# Altium footprint library 加热模块V2.4.PcbLib: 33 footprints (part 2 of 3)
Each footprint in its own frame and in the unit in brackets; x right, y up, seen from the top. Pads: shape width x height; smd on the part's side, far side on the other; paste and mask are expansions set on the pad; w line width, h text height; cw(c..) or ccw(c..) is an arc to the next point about the centre after c.
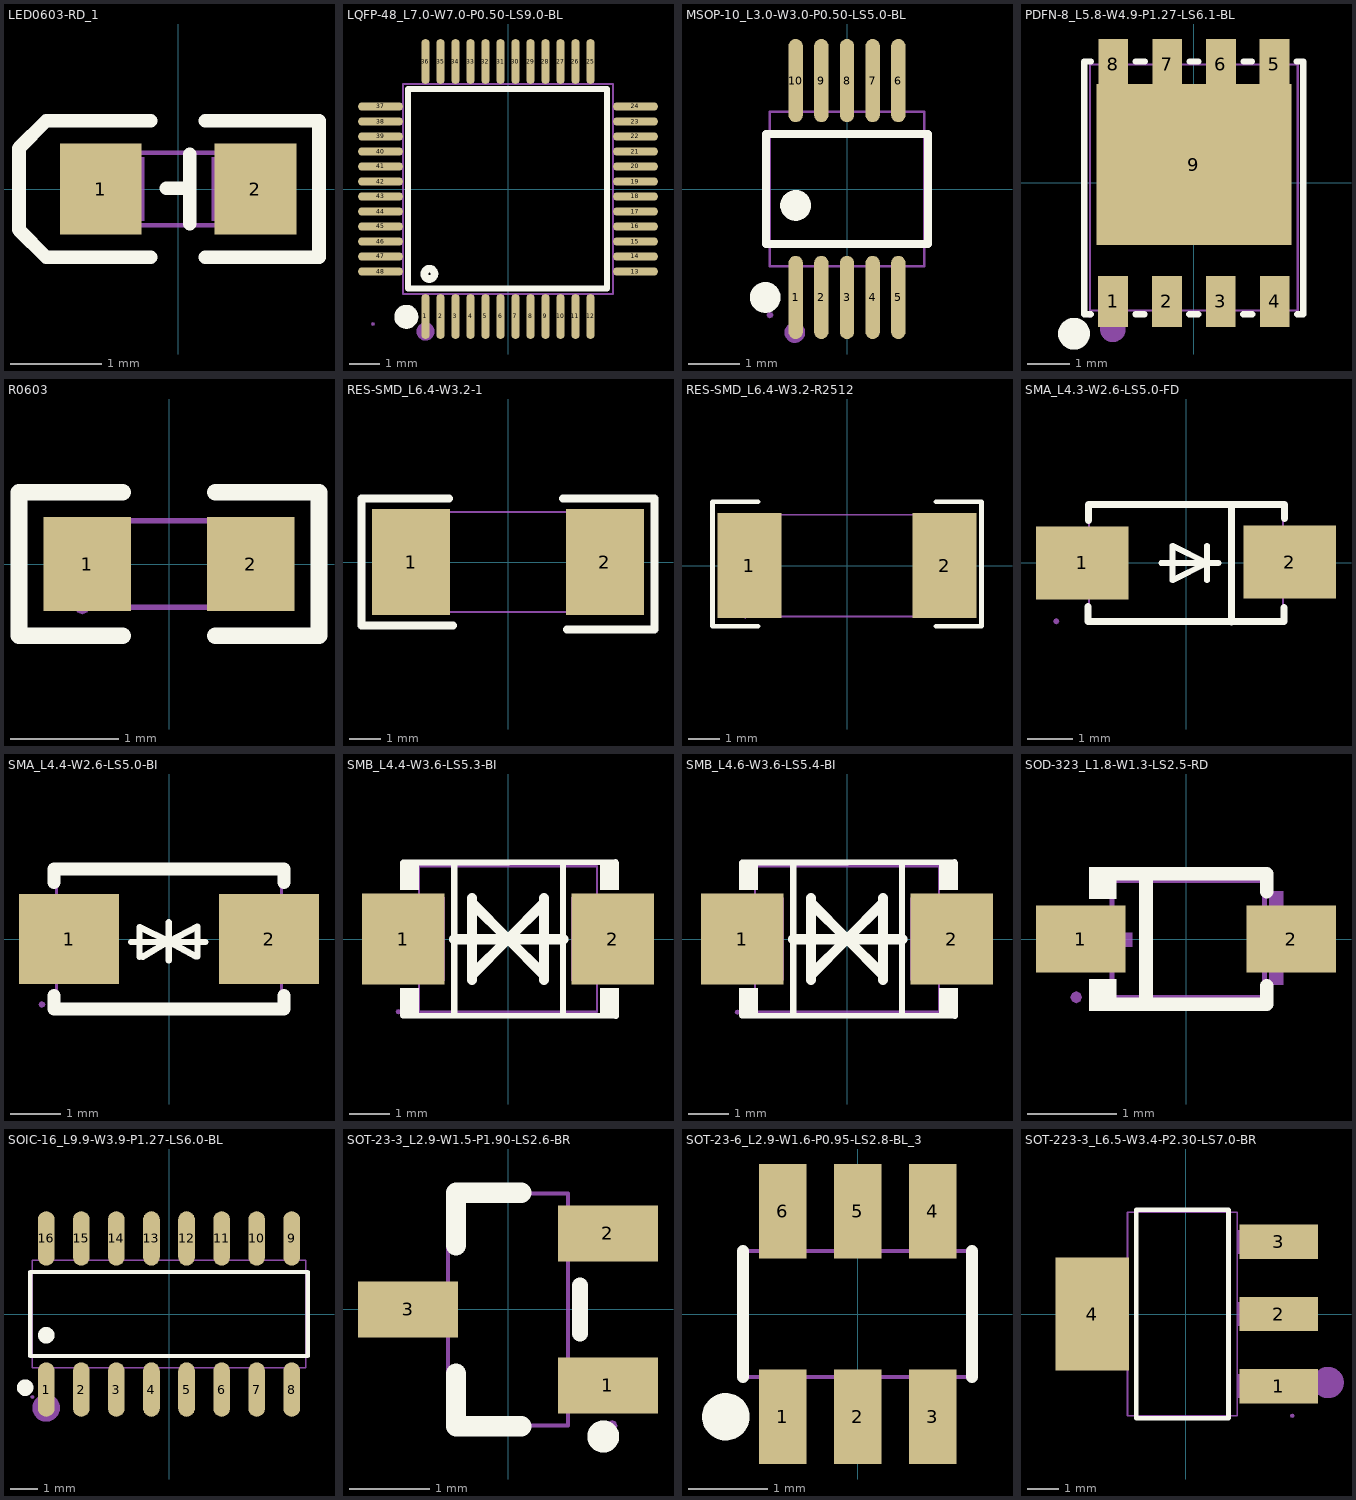
[diagram p1: the footprints below, top view; thin cyan lines are the x and y axes]

## LED0603-RD_1 [mm]
pads (2):
  rect 0.9x1 smd: 1(-0.85,0) 2(0.85,0)
Top Overlay:
  lines w0.15: -0.3,-0.75 -1.45,-0.75 -1.75,-0.45 -1.75,-0.35 -1.75,0.35 -1.75,0.45 -1.45,0.75 -0.3,0.75 ; -0.127,0.007 0.127,0.007 ; 0.127,-0.381 0.127,0.381 ; 0.3,-0.75 1.55,-0.75 ; 0.3,0.75 1.55,0.75 1.55,-0.73
Mechanical 6:
  region: 1.1,-0.1 0.5,-0.1 0.5,0.05 1.1,0.05
  region: -0.6,-0.1 -1.2,-0.1 -1.2,0.05 -0.6,0.05
  region: 0.865,0.273 0.865,-0.327 0.715,-0.327 0.715,0.273
Mechanical 15:
  region: 0.8,0.35 0.8,-0.35 0.37,-0.35 0.37,0.35
  region: -0.37,0.35 -0.37,-0.35 -0.8,-0.35 -0.8,0.35
  region: 0.8,0.465 0.754,0.446 0.735,0.4 0.754,0.354 0.8,0.335 0.846,0.354 0.865,0.4 0.846,0.446
  lines w0.051: -0.8,-0.4 -0.8,0.4 0.8,0.4 0.8,-0.4 -0.8,-0.4

## LQFP-48_L7.0-W7.0-P0.50-LS9.0-BL [mm]
pads (48):
  oval 0.27x1.5 smd paste+0 mask+0.05: 1(-2.75,-4.25) 2(-2.25,-4.25) 3(-1.75,-4.25) 4(-1.25,-4.25) 5(-0.75,-4.25) 6(-0.25,-4.25) 7(0.25,-4.25) 8(0.75,-4.25) 9(1.25,-4.25) 10(1.75,-4.25) 11(2.25,-4.25) 12(2.75,-4.25) 25(2.75,4.25) 26(2.25,4.25) 27(1.75,4.25) 28(1.25,4.25) 29(0.75,4.25) 30(0.25,4.25) 31(-0.25,4.25) 32(-0.75,4.25) 33(-1.25,4.25) 34(-1.75,4.25) 35(-2.25,4.25) 36(-2.75,4.25)
  oval 1.5x0.27 smd paste+0 mask+0.05: 13(4.25,-2.75) 14(4.25,-2.25) 15(4.25,-1.75) 16(4.25,-1.25) 17(4.25,-0.75) 18(4.25,-0.25) 19(4.25,0.25) 20(4.25,0.75) 21(4.25,1.25) 22(4.25,1.75) 23(4.25,2.25) 24(4.25,2.75) 37(-4.25,2.75) 38(-4.25,2.25) 39(-4.25,1.75) 40(-4.25,1.25) 41(-4.25,0.75) 42(-4.25,0.25) 43(-4.25,-0.25) 44(-4.25,-0.75) 45(-4.25,-1.25) 46(-4.25,-1.75) 47(-4.25,-2.25) 48(-4.25,-2.75)
Top Overlay:
  circle w0.254: c-2.62,-2.83 r0.17
  lines w0.2: -2.896,3.34 3.302,3.34 3.302,-3.315 -3.327,-3.315 -3.327,3.34 -2.565,3.34
  lines w0.4: -3.39,-4.06 ccw(c-3.389,-4.26) -3.387,-4.06
Mechanical 6:
  circle w0.3: c-2.75,-4.75 r0.15
Mechanical 15:
  drawing of 101 lines, arcs and shapes, not listed

## MSOP-10_L3.0-W3.0-P0.50-LS5.0-BL [mm]
pads (10):
  oval 0.28x1.62 smd: 1(-1,-2.11) 2(-0.5,-2.11) 3(0,-2.11) 4(0.5,-2.11) 5(1,-2.11) 6(1,2.11) 7(0.5,2.11) 8(0,2.11) 9(-0.5,2.11) 10(-1,2.11)
Top Overlay:
  circle w0.3: c-1,-0.319 r0.15
  circle w0.3: c-1.592,-2.11 r0.15
  lines w0.152: -1.576,-1.071 -1.576,1.071 1.576,1.071 1.576,-1.071 -1.576,-1.071
Mechanical 6:
  circle w0.2: c-1.016,-2.794 r0.1
Mechanical 15:
  region: -1.5,-2.515 -1.454,-2.496 -1.435,-2.45 -1.454,-2.404 -1.5,-2.385 -1.546,-2.404 -1.565,-2.45 -1.546,-2.496
  region: -1.112,-2.45 -1.112,-1.9 -0.888,-1.9 -0.888,-2.45
  region: -1.112,-1.91 -1.112,-1.49 -0.888,-1.49 -0.888,-1.91
  region: -0.612,-2.45 -0.612,-1.9 -0.388,-1.9 -0.388,-2.45
  region: -0.612,-1.91 -0.612,-1.49 -0.388,-1.49 -0.388,-1.91
  region: -0.112,-2.45 -0.112,-1.9 0.112,-1.9 0.112,-2.45
  region: -0.112,-1.91 -0.112,-1.49 0.112,-1.49 0.112,-1.91
  region: 0.388,-2.45 0.388,-1.9 0.612,-1.9 0.612,-2.45
  region: 0.388,-1.91 0.388,-1.49 0.612,-1.49 0.612,-1.91
  region: 0.888,-2.45 0.888,-1.9 1.112,-1.9 1.112,-2.45
  region: 0.888,-1.91 0.888,-1.49 1.112,-1.49 1.112,-1.91
  region: -1.112,2.45 -1.112,1.9 -0.888,1.9 -0.888,2.45
  region: -1.112,1.91 -1.112,1.49 -0.888,1.49 -0.888,1.91
  region: -0.612,2.45 -0.612,1.9 -0.388,1.9 -0.388,2.45
  region: -0.612,1.91 -0.612,1.49 -0.388,1.49 -0.388,1.91
  region: -0.112,2.45 -0.112,1.9 0.112,1.9 0.112,2.45
  region: -0.112,1.91 -0.112,1.49 0.112,1.49 0.112,1.91
  region: 0.388,2.45 0.388,1.9 0.612,1.9 0.612,2.45
  region: 0.388,1.91 0.388,1.49 0.612,1.49 0.612,1.91
  region: 0.888,2.45 0.888,1.9 1.112,1.9 1.112,2.45
  region: 0.888,1.91 0.888,1.49 1.112,1.49 1.112,1.91
  lines w0.051: -1.5,-1.5 -1.5,1.5 1.5,1.5 1.5,-1.5 -1.5,-1.5

## PDFN-8_L5.8-W4.9-P1.27-LS6.1-BL [mm]
pads (9):
  rect 0.7x1.2 smd paste-100 mask+0.05: 1(-1.905,-2.792) 2(-0.635,-2.792) 3(0.635,-2.792) 4(1.905,-2.792) 5(1.9,2.792) 6(0.64,2.792) 7(-0.63,2.792) 8(-1.9,2.792)
  rect 4.6x3.8 smd paste-100 mask+0.05: 9(0,0.433)
Top Overlay:
  lines w0.15: -2.58,2.863 -2.58,-3.097 -2.434,-3.097 ; -2.57,2.863 -2.429,2.863 ; -1.376,-3.097 -1.164,-3.097 ; -1.371,2.863 -1.159,2.863 ; -0.106,-3.097 0.106,-3.097 ; -0.101,2.863 0.111,2.863 ; 1.164,-3.097 1.376,-3.097 ; 1.169,2.863 1.371,2.863 ; 2.429,2.863 2.58,2.863 2.58,2.833 2.58,-3.097 2.434,-3.097
  lines w0.5: -2.95,-3.557 ccw(c-2.826,-3.556) -2.95,-3.555
Top Paste:
  region: -2.3,2.332 -2.3,-1.467 2.3,-1.467 2.3,2.332 2.25,2.332 2.25,3.393 1.55,3.393 1.55,2.332 0.99,2.332 0.99,3.392 0.291,3.392 0.291,2.332 -0.28,2.332 -0.28,3.392 -0.979,3.392 -0.979,2.332 -1.551,2.332 -1.551,3.392 -2.25,3.392 -2.25,2.333 -2.251,2.332
  region: 1.555,-2.192 2.255,-2.192 2.255,-3.392 1.555,-3.392
  region: 0.285,-2.192 0.985,-2.192 0.985,-3.392 0.285,-3.392
  region: -0.985,-2.192 -0.285,-2.192 -0.285,-3.392 -0.985,-3.392
  region: -2.255,-2.192 -1.555,-2.192 -1.555,-3.392 -2.255,-3.392
Mechanical 6:
  circle w0.3: c-1.91,-3.452 r0.15
Mechanical 15:
  region: 2.005,-1.183 -2.005,-1.183 -2.005,2.292 2.005,2.292
  region: 1.705,-2.475 2.105,-2.475 2.105,-3.11 1.705,-3.11
  region: 0.435,-2.475 0.835,-2.475 0.835,-3.11 0.435,-3.11
  region: -0.835,-2.475 -0.435,-2.475 -0.435,-3.11 -0.835,-3.11
  region: -2.105,-2.475 -1.705,-2.475 -1.705,-3.11 -2.105,-3.11
  region: -2.1,2.939 -1.7,2.939 -1.7,2.29 -2.1,2.29
  region: -0.83,2.939 -0.43,2.939 -0.43,2.29 -0.83,2.29
  region: 0.44,2.939 0.84,2.939 0.84,2.29 0.44,2.29
  region: 1.7,2.939 2.1,2.939 2.1,2.29 1.7,2.29
  region: -2.45,-3.045 -2.496,-3.064 -2.515,-3.11 -2.496,-3.156 -2.45,-3.175 -2.404,-3.156 -2.385,-3.11 -2.404,-3.064
  lines w0.051: -2.45,-3.007 -2.45,2.793 2.45,2.793 2.45,-3.007 -2.45,-3.007

## R0603 [mm]
pads (2):
  rect 0.806x0.864 smd paste-100 mask+0.051: 1(-0.753,0) 2(0.753,0)
Top Overlay:
  lines w0.152: -0.426,-0.661 -1.385,-0.661 -1.385,0.661 -0.426,0.661 ; 0.426,-0.661 1.385,-0.661 1.385,0.661 0.426,0.661
Top Paste:
  region: -1.195,-0.45 -0.395,-0.45 -0.345,-0.4 -0.345,-0.172 -0.715,-0.172 -0.715,0.158 -0.345,0.158 -0.345,0.4 -0.395,0.45 -1.195,0.45 -1.245,0.4 -1.245,-0.4
  region: 1.195,0.45 0.395,0.45 0.345,0.4 0.345,0.172 0.715,0.172 0.715,-0.158 0.345,-0.158 0.345,-0.4 0.395,-0.45 1.195,-0.45 1.245,-0.4 1.245,0.4
Mechanical 15:
  region: 0.8,-0.4 0.8,0.4 0.5,0.4 0.5,-0.4
  region: -0.8,-0.4 -0.8,0.4 -0.5,0.4 -0.5,-0.4
  region: -0.8,-0.465 -0.846,-0.446 -0.865,-0.4 -0.846,-0.354 -0.8,-0.335 -0.754,-0.354 -0.735,-0.4 -0.754,-0.446
  lines w0.051: -0.8,-0.4 0.8,-0.4 0.8,0.4 -0.8,0.4 -0.8,-0.4

## RES-SMD_L6.4-W3.2-1 [mm]
pads (2):
  rect 2.5x3.4 smd: 1(-3.1,0) 2(3.1,0)
Top Overlay:
  lines w0.254: -1.893,2.032 -4.687,2.032 -4.687,-2.032 -1.766,-2.032 ; 1.766,2.032 4.687,2.032 4.687,-2.159 1.893,-2.159
Mechanical 15:
  region: -3.2,-1.535 -3.246,-1.554 -3.265,-1.6 -3.246,-1.646 -3.2,-1.665 -3.154,-1.646 -3.135,-1.6 -3.154,-1.554
  region: -3.2,1.6 -2.3,1.6 -2.3,-1.6 -3.2,-1.6
  region: 2.3,1.6 3.2,1.6 3.2,-1.6 2.3,-1.6
  lines w0.051: -3.2,-1.6 3.2,-1.6 3.2,1.6 -3.2,1.6 -3.2,-1.6

## RES-SMD_L6.4-W3.2-R2512 [mm]
pads (2):
  rect 2x3.3 smd: 1(-3.066,0) 2(3.066,0)
Top Overlay:
  lines w0.152: -2.794,-1.905 -4.229,-1.905 -4.229,2.008 -2.794,2.008 ; 2.794,-1.905 4.229,-1.905 4.229,2.008 2.794,2.008
Mechanical 15:
  region: 2.299,1.6 3.199,1.6 3.199,-1.6 2.299,-1.6
  region: -3.199,1.6 -2.299,1.6 -2.299,-1.6 -3.199,-1.6
  region: -3.2,-1.535 -3.246,-1.554 -3.265,-1.6 -3.246,-1.646 -3.2,-1.665 -3.154,-1.646 -3.135,-1.6 -3.154,-1.554
  lines w0.051: -3.2,-1.6 3.2,-1.6 3.2,1.6 -3.2,1.6 -3.2,-1.6

## SMA_L4.3-W2.6-LS5.0-FD [mm]
pads (2):
  rect 2.046x1.62 smd: 1(-2.304,-0.009) 2(2.304,0.009)
Top Overlay:
  lines w0.127: -0.551,-0.01 0.719,-0.01 ; 0.465,-0.391 0.465,-0.01 ; 0.465,0.371 0.465,-0.01 ; 0.465,-0.01 -0.297,0.371 -0.297,-0.01 -0.297,-0.391 0.465,-0.01
  lines w0.152: -2.17,-0.979 -2.17,-1.309 2.177,-1.309 2.177,-0.998 ; -2.16,0.93 -2.16,1.288 2.186,1.288 2.186,0.977 ; 1.007,-1.321 1.007,1.276
Mechanical 6:
  region: 2.432,0.097 2.432,-0.097 1.659,-0.097 1.659,0.097
  region: -2.432,0.097 -2.432,-0.097 -1.659,-0.097 -1.659,0.097
  region: -2.142,0.644 -2.142,-0.644 -1.949,-0.644 -1.949,0.644
Mechanical 15:
  region: -2.5,-0.734 -2.5,0.716 -1.35,0.716 -1.35,-0.734
  region: 2.5,0.734 2.5,-0.716 1.35,-0.716 1.35,0.734
  region: -2.879,-1.235 -2.833,-1.254 -2.814,-1.3 -2.833,-1.346 -2.879,-1.365 -2.925,-1.346 -2.944,-1.3 -2.925,-1.254
  lines w0.051: -2.15,-1.3 2.15,-1.3 2.15,1.3 -2.15,1.3 -2.15,-1.3

## SMA_L4.4-W2.6-LS5.0-BI [mm]
pads (2):
  rect 2x1.8 smd: 1(-2,0) 2(2,0)
Top Overlay:
  lines w0.127: -0.76,-0.06 0.73,-0.06 ; -0.59,-0.36 -0.59,0.24 -0.002,-0.049 ; -0.53,-0.36 -0.002,-0.049 ; -0.002,-0.43 -0.002,-0.049 ; -0.002,0.332 -0.002,-0.049 ; 0.54,-0.35 -0.002,-0.049 ; 0.57,-0.35 0.57,0.25 -0.002,-0.049
  lines w0.254: -2.3,-1.131 -2.3,-1.4 2.3,-1.4 2.3,-1.131 ; -2.3,1.131 -2.3,1.4 2.3,1.4 2.3,1.131
Mechanical 15:
  region: 1.458,-0.725 1.458,0.725 2.542,0.725 2.542,-0.725
  region: -2.542,-0.725 -2.542,0.725 -1.458,0.725 -1.458,-0.725
  region: -2.478,-1.308 -2.497,-1.353 -2.543,-1.373 -2.588,-1.353 -2.607,-1.308 -2.588,-1.262 -2.543,-1.243 -2.497,-1.262
  lines w0.051: -2.25,-1.308 2.25,-1.308 2.25,1.307 -2.25,1.307 -2.25,-1.308

## SMB_L4.4-W3.6-LS5.3-BI [mm]
pads (2):
  rect 2.047x2.241 smd: 1(-2.591,0) 2(2.591,0)
Top Overlay:
  region: 2.286,-1.905 2.286,-1.215 2.743,-1.215 2.743,-1.905
  region: 2.286,1.905 2.286,1.215 2.743,1.215 2.743,1.905
  region: -2.667,1.905 -2.667,1.215 -2.21,1.215 -2.21,1.905
  region: -2.667,-1.905 -2.667,-1.215 -2.21,-1.215 -2.21,-1.905
  lines w0.152: -2.599,-1.89 2.667,-1.905 ; -2.591,1.887 2.663,1.905 ; -1.332,-1.886 -1.332,1.886 ; 1.364,-1.886 1.364,1.886
  lines w0.254: -1.331,-0.008 1.364,-0.008 ; 0,0 -0.889,0.889 -0.889,1.016 -0.889,-1.016 -0.889,-0.889 0,0 ; 0,0 0.889,-0.889 0.889,-1.016 0.889,1.016 0.889,0.889 0,0
Mechanical 15:
  region: 2.708,1.037 2.708,-1.037 1.568,-1.037 1.568,1.037
  region: -2.708,1.037 -2.708,-1.037 -1.568,-1.037 -1.568,1.037
  region: -2.708,-1.865 -2.754,-1.846 -2.773,-1.8 -2.754,-1.754 -2.708,-1.735 -2.662,-1.754 -2.643,-1.8 -2.662,-1.846
  lines w0.051: -2.2,-1.8 2.2,-1.8 2.2,1.8 -2.2,1.8 -2.2,-1.8

## SMB_L4.6-W3.6-LS5.4-BI [mm]
pads (2):
  rect 2.047x2.241 smd: 1(-2.591,0) 2(2.591,0)
Top Overlay:
  region: 2.286,-1.905 2.286,-1.215 2.743,-1.215 2.743,-1.905
  region: 2.286,1.905 2.286,1.215 2.743,1.215 2.743,1.905
  region: -2.667,1.905 -2.667,1.215 -2.21,1.215 -2.21,1.905
  region: -2.667,-1.905 -2.667,-1.215 -2.21,-1.215 -2.21,-1.905
  lines w0.152: -2.599,-1.89 2.667,-1.905 ; -2.591,1.887 2.663,1.905 ; -1.331,-1.886 -1.331,1.886 ; 1.364,-1.886 1.364,1.886
  lines w0.254: -1.331,-0.008 1.364,-0.008 ; 0,0 -0.889,0.889 -0.889,1.016 -0.889,-1.016 -0.889,-0.889 0,0 ; 0,0 0.889,-0.889 0.889,-1.016 0.889,1.016 0.889,0.889 0,0
Mechanical 15:
  region: 2.7,1.025 2.7,-1.025 1.568,-1.025 1.568,1.025
  region: -2.7,1.025 -2.7,-1.025 -1.568,-1.025 -1.568,1.025
  region: -2.708,-1.745 -2.662,-1.764 -2.643,-1.81 -2.662,-1.856 -2.708,-1.875 -2.754,-1.856 -2.773,-1.81 -2.754,-1.764
  lines w0.051: -2.275,-1.8 -2.275,1.8 2.275,1.8 2.275,-1.8 -2.275,-1.8

## SOD-323_L1.8-W1.3-LS2.5-RD [mm]
pads (2):
  rect 1x0.75 smd: 1(-1.173,0) 2(1.173,0)
Top Overlay:
  region: -0.775,-0.802 -0.775,-0.45 -1.08,-0.45 -1.08,-0.802
  region: -0.775,0.802 -0.775,0.45 -1.08,0.45 -1.08,0.802
  lines w0.152: -0.851,-0.726 0.901,-0.726 0.901,-0.52 ; -0.851,0.726 0.901,0.726 0.901,0.53 ; -0.447,-0.726 -0.447,0.726
Mechanical 6:
  region: 1.083,0.53 1.083,-0.51 0.927,-0.51 0.927,0.53
  region: 1.315,0.09 1.315,-0.066 0.691,-0.066 0.691,0.09
  region: -1.225,0.07 -1.225,-0.086 -0.601,-0.086 -0.601,0.07
Mechanical 15:
  region: -0.815,0.16 -0.815,-0.16 -0.935,-0.16 -0.935,0.16
  region: -0.925,0.16 -0.925,-0.16 -1.225,-0.16 -1.225,0.16
  region: 0.985,0.16 0.985,-0.16 0.865,-0.16 0.865,0.16
  region: 1.275,0.16 1.275,-0.16 0.975,-0.16 0.975,0.16
  region: -1.16,-0.65 -1.179,-0.604 -1.225,-0.585 -1.271,-0.604 -1.29,-0.65 -1.271,-0.696 -1.225,-0.715 -1.179,-0.696
  lines w0.051: -0.825,-0.65 -0.825,0.65 0.875,0.65 0.875,-0.65 -0.825,-0.65

## SOIC-16_L9.9-W3.9-P1.27-LS6.0-BL [mm]
pads (16):
  oval 0.602x1.971 smd: 1(-4.445,-2.736) 2(-3.175,-2.736) 3(-1.905,-2.736) 4(-0.635,-2.736) 5(0.635,-2.736) 6(1.905,-2.736) 7(3.175,-2.736) 8(4.445,-2.736) 9(4.445,2.736) 10(3.175,2.736) 11(1.905,2.736) 12(0.635,2.736) 13(-0.635,2.736) 14(-1.905,2.736) 15(-3.175,2.736) 16(-4.445,2.736)
Top Overlay:
  circle w0.3: c-5.207,-2.667 r0.15
  circle w0.3: c-4.445,-0.769 r0.15
  lines w0.152: -5.026,-1.521 5.026,-1.521 5.026,1.521 -5.026,1.521 -5.026,-1.521
Mechanical 6:
  circle w0.5: c-4.445,-3.4 r0.25
Mechanical 15:
  region: 4.23,2.31 4.23,1.94 4.66,1.94 4.66,2.31
  region: 4.23,3 4.23,2.3 4.66,2.3 4.66,3
  region: 2.96,2.31 2.96,1.94 3.39,1.94 3.39,2.31
  region: 2.96,3 2.96,2.3 3.39,2.3 3.39,3
  region: 1.69,2.31 1.69,1.94 2.12,1.94 2.12,2.31
  region: 1.69,3 1.69,2.3 2.12,2.3 2.12,3
  region: 0.42,2.31 0.42,1.94 0.85,1.94 0.85,2.31
  region: 0.42,3 0.42,2.3 0.85,2.3 0.85,3
  region: -0.85,2.31 -0.85,1.94 -0.42,1.94 -0.42,2.31
  region: -0.85,3 -0.85,2.3 -0.42,2.3 -0.42,3
  region: -2.12,2.31 -2.12,1.94 -1.69,1.94 -1.69,2.31
  region: -2.12,3 -2.12,2.3 -1.69,2.3 -1.69,3
  region: -3.39,2.31 -3.39,1.94 -2.96,1.94 -2.96,2.31
  region: -3.39,3 -3.39,2.3 -2.96,2.3 -2.96,3
  region: -4.66,2.31 -4.66,1.94 -4.23,1.94 -4.23,2.31
  region: -4.66,3 -4.66,2.3 -4.23,2.3 -4.23,3
  region: 4.23,-2.31 4.23,-1.94 4.66,-1.94 4.66,-2.31
  region: 4.23,-3 4.23,-2.3 4.66,-2.3 4.66,-3
  region: 2.96,-2.31 2.96,-1.94 3.39,-1.94 3.39,-2.31
  region: 2.96,-3 2.96,-2.3 3.39,-2.3 3.39,-3
  region: 1.69,-2.31 1.69,-1.94 2.12,-1.94 2.12,-2.31
  region: 1.69,-3 1.69,-2.3 2.12,-2.3 2.12,-3
  region: 0.42,-2.31 0.42,-1.94 0.85,-1.94 0.85,-2.31
  region: 0.42,-3 0.42,-2.3 0.85,-2.3 0.85,-3
  region: -0.85,-2.31 -0.85,-1.94 -0.42,-1.94 -0.42,-2.31
  region: -0.85,-3 -0.85,-2.3 -0.42,-2.3 -0.42,-3
  region: -2.12,-2.31 -2.12,-1.94 -1.69,-1.94 -1.69,-2.31
  region: -2.12,-3 -2.12,-2.3 -1.69,-2.3 -1.69,-3
  region: -3.39,-2.31 -3.39,-1.94 -2.96,-1.94 -2.96,-2.31
  region: -3.39,-3 -3.39,-2.3 -2.96,-2.3 -2.96,-3
  region: -4.66,-2.31 -4.66,-1.94 -4.23,-1.94 -4.23,-2.31
  region: -4.66,-3 -4.66,-2.3 -4.23,-2.3 -4.23,-3
  region: -5.015,-3 -4.996,-3.046 -4.95,-3.065 -4.904,-3.046 -4.885,-3 -4.904,-2.954 -4.95,-2.935 -4.996,-2.954
  lines w0.051: -4.95,-1.95 4.95,-1.95 4.95,1.95 -4.95,1.95 -4.95,-1.95

## SOT-23-3_L2.9-W1.5-P1.90-LS2.6-BR [mm]
pads (3):
  rect 1.25x0.7 smd: 1(1.25,-0.95) 2(1.25,0.95) 3(-1.25,0)
Top Overlay:
  circle w0.2: c1.19,-1.588 r0.1
  lines w0.2: 0.9,-0.3 0.9,0.3
  lines w0.254: -0.65,-0.8 -0.65,-1.46 0.165,-1.46 ; 0.165,1.46 -0.65,1.46 ; -0.65,0.8 -0.65,1.46 ; -0.65,0.8 -0.65,1.46 ; -0.65,0.8 -0.65,1.46
Mechanical 6:
  circle w0.254: c1.214,-0.983 r0.127
Mechanical 15:
  region: 0.74,0.737 0.74,1.162 1.11,1.162 1.11,0.737
  region: 1.1,0.737 1.1,1.162 1.3,1.162 1.3,0.737
  region: 0.74,-1.162 0.74,-0.737 1.11,-0.737 1.11,-1.162
  region: 1.1,-1.162 1.1,-0.737 1.3,-0.737 1.3,-1.162
  region: -1.11,-0.212 -1.11,0.212 -0.74,0.212 -0.74,-0.212
  region: -1.3,-0.212 -1.3,0.212 -1.1,0.212 -1.1,-0.212
  region: 1.365,-1.45 1.346,-1.496 1.3,-1.515 1.254,-1.496 1.235,-1.45 1.254,-1.404 1.3,-1.385 1.346,-1.404
  lines w0.051: -0.75,-1.45 0.75,-1.45 0.75,1.45 -0.75,1.45 -0.75,-1.45

## SOT-23-6_L2.9-W1.6-P0.95-LS2.8-BL_3 [mm]
pads (6):
  rect 0.6x1.2 smd: 1(-0.95,-1.3) 2(0,-1.3) 3(0.95,-1.3) 4(0.95,1.3) 5(0,1.3) 6(-0.95,1.3)
Top Overlay:
  circle w0.3: c-1.668,-1.301 r0.15
  lines w0.152: -1.45,-0.8 -1.45,0.8 ; 1.45,-0.8 1.45,0.8
Mechanical 6:
  circle w0.2: c-0.92,-1.68 r0.1
Mechanical 15:
  lines w0.051: -1.45,-0.8 -1.45,0.8 1.45,0.8 1.45,-0.8 -1.45,-0.8

## SOT-223-3_L6.5-W3.4-P2.30-LS7.0-BR [mm]
pads (4):
  rect 2.5x1.1 smd: 1(2.97,-2.3) 2(2.97,0) 3(2.97,2.3)
  rect 2.34x3.6 smd: 4(-2.97,0)
Top Overlay:
  lines w0.152: -1.571,-3.326 1.371,-3.326 1.371,3.326 -1.571,3.326 -1.571,-3.326
Mechanical 6:
  circle w0.5: c4.552,-2.188 r0.25
Mechanical 15:
  region: -3.6,-1.5 -3.6,1.5 -2.85,1.5 -2.85,-1.5
  region: -2.86,-1.5 -2.86,1.5 -1.84,1.5 -1.84,-1.5
  region: 2.65,-2.675 2.65,-1.925 3.4,-1.925 3.4,-2.675
  region: 1.64,-2.675 1.64,-1.925 2.66,-1.925 2.66,-2.675
  region: 2.65,-0.375 2.65,0.375 3.4,0.375 3.4,-0.375
  region: 1.64,-0.375 1.64,0.375 2.66,0.375 2.66,-0.375
  region: 2.65,1.925 2.65,2.675 3.4,2.675 3.4,1.925
  region: 1.64,1.925 1.64,2.675 2.66,2.675 2.66,1.925
  region: 3.4,-3.315 3.354,-3.296 3.335,-3.25 3.354,-3.204 3.4,-3.185 3.446,-3.204 3.465,-3.25 3.446,-3.296
  lines w0.051: -1.85,-3.25 1.65,-3.25 1.65,3.25 -1.85,3.25 -1.85,-3.25